# Altium footprint library iMX6 Rex Development Baseboard V1I1_PCB.PcbLib: 77 footprints (part 1 of 5)
Each footprint in its own frame and in the unit in brackets; x right, y up, seen from the top. Pads: shape width x height; smd on the part's side, far side on the other; paste and mask are expansions set on the pad; w line width, h text height; cw(c..) or ccw(c..) is an arc to the next point about the centre after c.
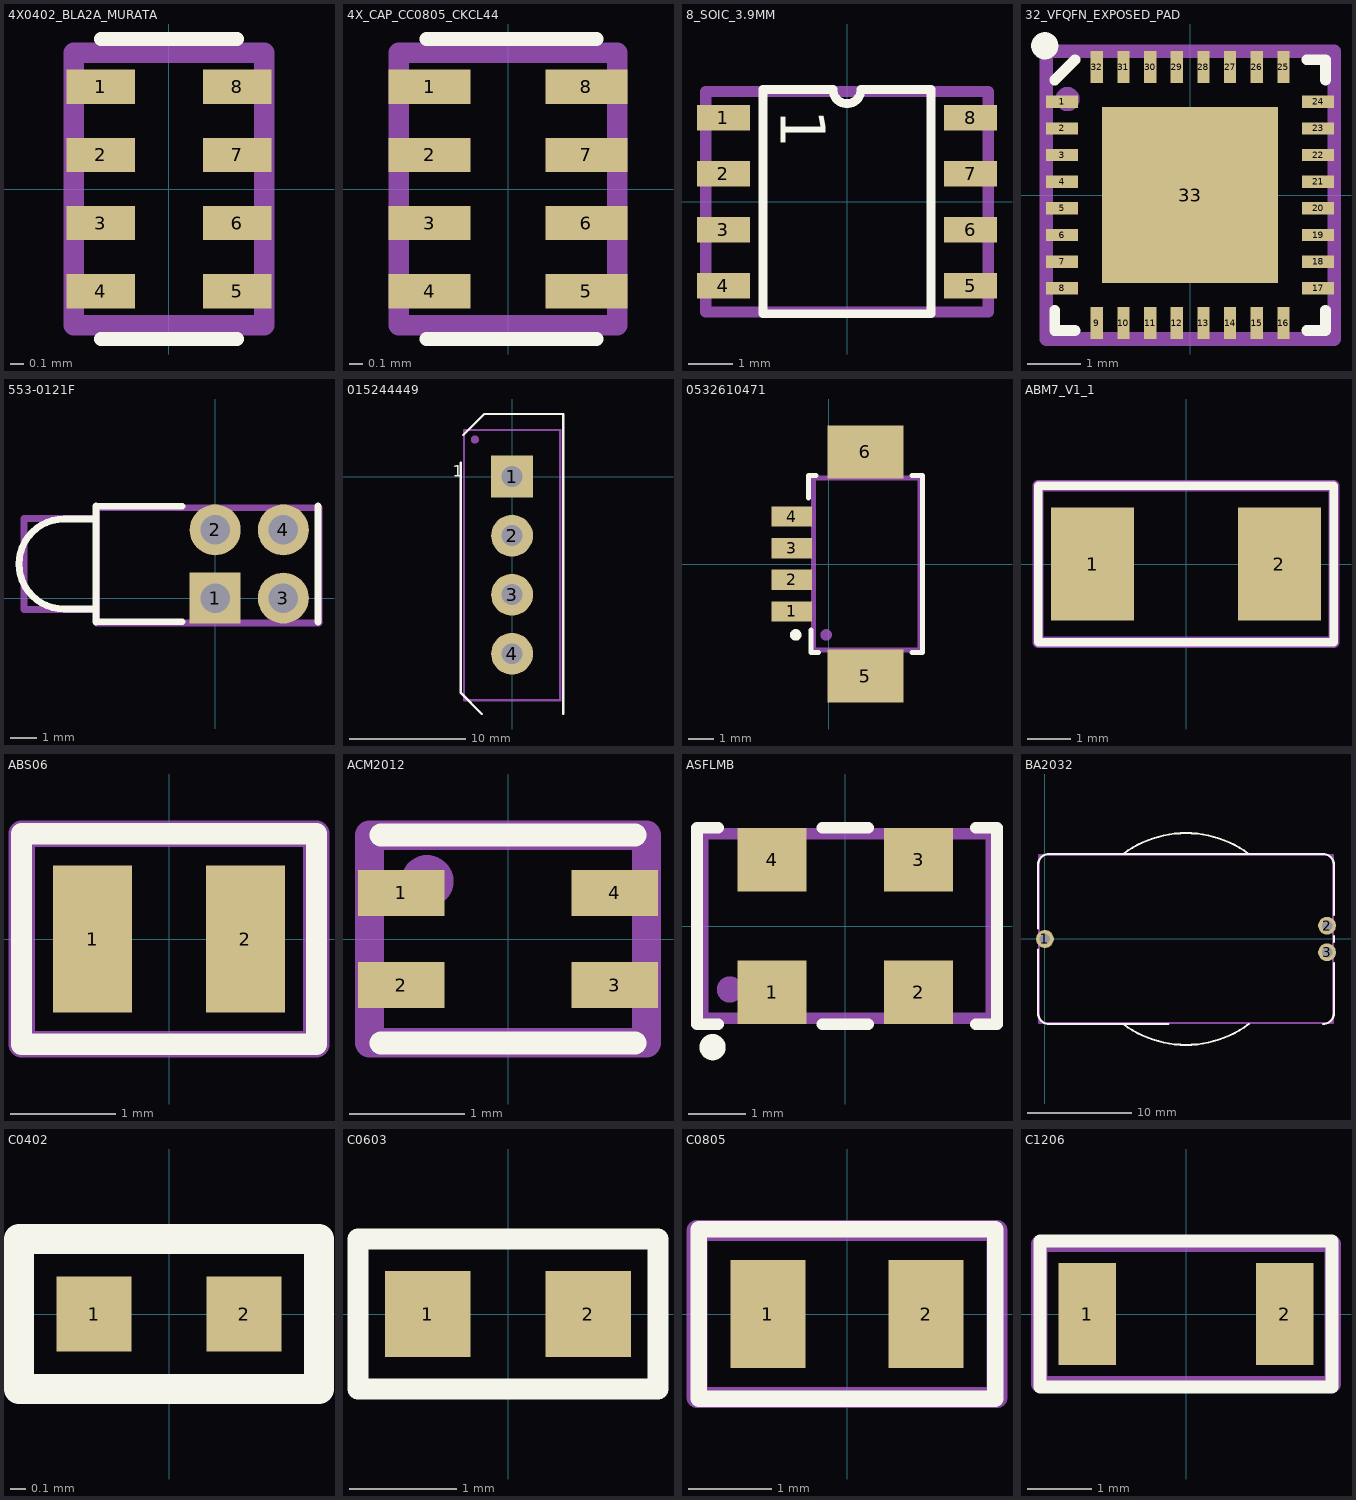
[diagram p0: the footprints below, top view; thin cyan lines are the x and y axes]

## 4X0402_BLA2A_MURATA [mm]
pads (8):
  rect 0.5x0.25 smd mask+0.025: 1(-0.5,0.75) 2(-0.5,0.25) 3(-0.5,-0.25) 4(-0.5,-0.75) 5(0.5,-0.75) 6(0.5,-0.25) 7(0.5,0.25) 8(0.5,0.75)
Top Overlay:
  lines w0.1: -0.5,-1.1 0.5,-1.1 ; -0.5,1.1 0.5,1.1
Mechanical 16:
  lines w0.15: -0.7,-1 0.7,-1 0.7,1 -0.7,1 -0.7,-1
Mechanical 29:
  text ".Designator" at 0.2,-0.7 h0.4
3D body: height 0.5, standoff 0, extent -0.5,-1 0.5,1

## 4X_CAP_CC0805_CKCL44 [mm]
pads (8):
  rect 0.6x0.25 smd mask+0.025: 1(-0.575,0.75) 2(-0.575,0.25) 3(-0.575,-0.25) 4(-0.575,-0.75) 5(0.575,-0.75) 6(0.575,-0.25) 7(0.575,0.25) 8(0.575,0.75)
Top Overlay:
  lines w0.1: -0.6,-1.1 0.65,-1.1 ; -0.6,1.1 0.65,1.1
Mechanical 16:
  lines w0.15: -0.8,-1 -0.8,1 0.8,1 0.8,-1 -0.8,-1
Mechanical 29:
  text ".Designator" at -0.2,0.7 h0.4
3D body: height 1, standoff 0, extent -0.7,-1 0.7,1

## 8_SOIC_3.9MM [mm]
pads (8):
  rect 1.2x0.58 smd: 1(-2.8,1.905) 2(-2.8,0.635) 3(-2.8,-0.635) 4(-2.8,-1.905) 5(2.8,-1.905) 6(2.8,-0.635) 7(2.8,0.635) 8(2.8,1.905)
Top Overlay:
  lines w0.2: -1.905,-2.54 1.905,-2.54 1.905,2.54 0.318,2.54 cw(c0,2.54) -0.318,2.54 -1.905,2.54 -1.905,-2.54
  text "1" at -1.5,2.1 h1.02
Mechanical 16:
  circle w0.254: c-2.7,1.9 r0.1
  lines w0.254: -3.2,-2.5 -3.2,2.5 3.2,2.5 3.2,-2.5 -3.2,-2.5
Mechanical 29:
  text ".Designator" at 1.1,0.6 h1.52
3D body "SOIC-8-1.step": height 1.75, standoff 0, extent -3,-2.45 3,2.45

## 32_VFQFN_EXPOSED_PAD [mm]
pads (33):
  rect 0.6x0.23 smd mask+0.051: 1(-2.4,1.75) 2(-2.4,1.25) 3(-2.4,0.75) 4(-2.4,0.25) 5(-2.4,-0.25) 6(-2.4,-0.75) 7(-2.4,-1.25) 8(-2.4,-1.75) 17(2.4,-1.75) 18(2.4,-1.25) 19(2.4,-0.75) 20(2.4,-0.25) 21(2.4,0.25) 22(2.4,0.75) 23(2.4,1.25) 24(2.4,1.75)
  rect 0.23x0.6 smd mask+0.051: 9(-1.75,-2.4) 10(-1.25,-2.4) 11(-0.75,-2.4) 12(-0.25,-2.4) 13(0.25,-2.4) 14(0.75,-2.4) 15(1.25,-2.4) 16(1.75,-2.4) 25(1.75,2.4) 26(1.25,2.4) 27(0.75,2.4) 28(0.25,2.4) 29(-0.25,2.4) 30(-0.75,2.4) 31(-1.25,2.4) 32(-1.75,2.4)
  rect 3.3x3.3 smd paste-10 mask+0.051: 33(0,0)
Top Overlay:
  circle w0.254: c-2.727,2.8 r0.127
  lines w0.2: -2.54,-2.54 -2.54,-2.159 ; -2.54,2.159 -2.159,2.54 ; -2.508,-2.54 -2.159,-2.54 ; 2.191,-2.54 2.54,-2.54 2.54,-2.159 ; 2.191,2.54 2.54,2.54 2.54,2.159
Top Paste:
  rectangle: -1.5,0.1 -0.1,1.5
  rectangle: 0.1,0.1 1.5,1.5
  rectangle: -1.5,-1.5 -0.1,-0.1
  rectangle: 0.1,-1.5 1.5,-0.1
Mechanical 16:
  circle w0.254: c-2.3,1.8 r0.1
  lines w0.254: -2.7,-2.7 -2.7,2.7 2.7,2.7 2.7,-2.7 -2.7,-2.7
Mechanical 29:
  text ".Designator" at 2,0.7 h1.52
3D body: height 0.9, standoff 0, extent -2.54,-2.54 2.54,2.54

## 553-0121F [mm]
pads (4):
  rect 1.9x1.9 hole 1.1: 1(0,0)
  round 1.9 hole 1.1: 2(0,2.54) 3(2.54,0) 4(2.54,2.54)
Top Overlay:
  lines w0.254: -4.445,-0.889 -4.445,3.429 ; -4.445,-0.406 -5.639,-0.406 cw(c-5.639,1.27) -5.639,2.946 -4.445,2.946 ; -4.43,-0.88 -1.23,-0.88 ; -4.43,3.42 -1.23,3.42 ; 3.833,-0.889 3.833,3.429
Mechanical 16:
  lines w0.254: -4.43,-0.43 -7.13,-0.43 -7.13,2.97 -4.43,2.97 ; -4.43,-0.93 -4.43,3.37 3.87,3.37 3.87,-0.93 -4.43,-0.93
Mechanical 29:
  text ".Designator" at -2.5,0.5 h1.52
3D body "55307XXF.stp": height 9.65, standoff -3.68, extent -7.28,-0.898 3.718,3.42

## 015244449 [mm]
pads (4):
  rect 3.6x3.6 hole 1.8: 1(0,0)
  round 3.6 hole 1.8: 2(0,-5.08) 3(0,-10.16) 4(0,-15.24)
Top Overlay:
  lines w0.2: -4.4,1.2 -4.4,-18.62 -2.6,-20.42 ; -4.2,3.58 -2.4,5.38 4.4,5.38 4.4,-20.42
  text "1" at -5.1,0 h1.02
Mechanical 16:
  circle w0.5: c-3.2,3.18 r0.1
  lines w0.2: -4.14,-19.25 4.14,-19.25 4.14,4.01 -4.14,4.01 -4.14,-19.25
Mechanical 29:
  text ".Designator" at 0.5,-10.02 h1.52
3D body "015244449.stp": height 10.16, standoff -3.6, extent -4.13,-19.25 4.15,4.01

## 0532610471 [mm]
pads (6):
  rect 1.6x0.8 smd: 1(-1.45,-1.875) 2(-1.45,-0.625) 3(-1.45,0.625) 4(-1.45,1.875)
  rect 3x2.1 smd: 5(1.45,-4.425) 6(1.45,4.425)
Top Overlay:
  circle w0.254: c-1.3,-2.8 r0.1
  lines w0.2: -0.8,2.6 -0.8,3.5 -0.5,3.5 ; -0.7,-2.6 -0.7,-3.5 -0.4,-3.5 ; 3.3,-3.5 3.7,-3.5 3.7,3.5 3.3,3.5
Mechanical 16:
  circle w0.254: c-0.1,-2.8 r0.1
  lines w0.2: -0.6,-3.4 -0.6,3.4 3.6,3.4 3.6,-3.4 -0.6,-3.4
Mechanical 29:
  text ".Designator" at 2.1,-2 h1.52
3D body "532610471.stp": height 3.39, standoff -0.01, extent -1.6,-5.075 3.6,5.075

## ABM7_V1_1 [mm]
pads (2):
  rect 1.9x2.6 smd: 1(-2.15,0) 2(2.15,0)
Top Overlay:
  lines w0.2: -3.4,-1.8 3.4,-1.8 3.4,1.8 -3.4,1.8 -3.4,-1.8
Mechanical 16:
  lines w0.254: -3.4,-1.8 3.4,-1.8 3.4,1.8 -3.4,1.8 -3.4,-1.8
Mechanical 29:
  text ".Designator" at 0.9,0.6 h1.52
3D body: height 1.45, standoff 1.4, extent -2,-1.3 2,1.5
3D body "Xtal-ABM7.STEP": height 1.44, standoff 0.04, extent -3.1,-1.85 3.1,1.85

## ABS06 [mm]
pads (2):
  rect 0.75x1.4 smd: 1(-0.725,0) 2(0.725,0)
Top Overlay:
  lines w0.2: -1.4,-1 1.4,-1 1.4,1 -1.4,1 -1.4,0 -1.4,-1
Mechanical 16:
  lines w0.254: -1.4,-1 -1.4,1 1.4,1 1.4,-1 -1.4,-1
Mechanical 29:
  text ".Designator" at -0.5,-0.3 h0.6
3D body: height 0.61, standoff 0.5, extent -0.825,-0.36 0.825,0.34
3D body "ABS06.STEP": height 0.6, standoff 0, extent -1,-0.62 1,0.6

## ACM2012 [mm]
pads (4):
  rect 0.75x0.4 smd mask+0.076: 1(-0.925,0.4) 2(-0.925,-0.4) 3(0.925,-0.4) 4(0.925,0.4)
Top Overlay:
  lines w0.2: -1.1,-0.9 1.1,-0.9 ; -1.1,0.9 1.1,0.9
Mechanical 16:
  circle w0.254: c-0.7,0.5 r0.1
  lines w0.254: -1.2,-0.9 1.2,-0.9 1.2,0.9 -1.2,0.9 -1.2,-0.9
Mechanical 29:
  text ".Designator" at 0.3,0.1 h0.4
3D body: height 1.3, standoff 0, extent -1.2,-0.7 1.2,0.7

## ASFLMB [mm]
pads (4):
  rect 1.2x1.1 smd: 1(-1.27,-1.15) 2(1.27,-1.15) 3(1.27,1.15) 4(-1.27,1.15)
Top Overlay:
  circle w0.254: c-2.3,-2.1 r0.1
  lines w0.2: -2.2,-1.7 -2.57,-1.7 -2.57,1.7 -2.2,1.7 ; -0.4,-1.7 0.4,-1.7 ; -0.4,1.7 0.4,1.7 ; 2.26,-1.7 2.63,-1.7 2.63,1.7 2.26,1.7
Mechanical 16:
  circle w0.254: c-2,-1.1 r0.1
  lines w0.2: -2.47,-1.6 2.53,-1.6 2.53,1.6 -2.47,1.6 -2.47,-1.6
Mechanical 29:
  text ".Designator" at 0.3,-0.5 h0.8
3D body: height 0.9, standoff 0, extent -2.47,-1.6 2.53,1.6

## BA2032 [mm]
pads (3):
  round 1.7 hole 1: 1(0,0) 2(26.9,1.27) 3(26.9,-1.27)
Top Overlay:
  lines w0.2: -0.65,-1 -0.65,-7.1 ccw(c0.375,-7.075) 0.4,-8.1 11.8,-8.1 ; -0.65,1 -0.65,7.1 cw(c0.375,7.075) 0.4,8.1 26.5,8.1 cw(c26.525,7.075) 27.55,7.1 27.55,2.3 ; 7.45,-8.1 ccw(c13.45,-0.1) 19.45,-8.1 ; 7.45,8.1 cw(c13.45,0.1) 19.45,8.1 ; 26.5,-8.1 ccw(c26.525,-7.075) 27.55,-7.1 27.55,-2.3 ; 27.55,-0.3 27.55,0.3
Mechanical 16:
  lines w0.2: -0.55,-8 -0.55,8 27.45,8 27.45,-8 -0.55,-8
Mechanical 29:
  text ".Designator" at 13,2.1 h1.52
3D body "BU2032-1-HD-G.STEP": height 5.25, standoff -3.8, extent -0.85,-10 27.75,10

## C0402 [mm]
pads (2):
  rect 0.5x0.5 smd: 1(-0.5,0) 2(0.5,0)
Top Overlay:
  lines w0.2: -1,-0.5 1,-0.5 1,0.5 -1,0.5 -1,-0.5
Mechanical 16:
  lines w0.15: -1,-0.5 1,-0.5 1,0.5 -1,0.5 -1,-0.5
Mechanical 29:
  text ".Designator" at 0.7,0.2 h0.4
3D body "CAPC1005X56N EIA 0402.step": height 0.56, standoff 0, extent -0.5,-0.25 0.5,0.25

## C0603 [mm]
pads (2):
  rect 0.8x0.8 smd: 1(-0.75,0) 2(0.75,0)
Top Overlay:
  lines w0.2: -1.4,-0.7 1.4,-0.7 1.4,0.7 -1.4,0.7 -1.4,-0.7
Mechanical 16:
  lines w0.15: -1.4,-0.7 -1.4,0.7 1.4,0.7 1.4,-0.7 -1.4,-0.7
Mechanical 29:
  text ".Designator" at -1.1,-0.3 h0.6
3D body "C0603.step": height 0.95, standoff 0.15, extent -0.8,-0.425 0.8,0.435
3D body "C0603.step": height 0.79, standoff 0, extent -0.8,-0.425 0.8,0.435

## C0805 [mm]
pads (2):
  rect 0.9x1.3 smd: 1(-0.95,0) 2(0.95,0)
Top Overlay:
  lines w0.2: -1.778,-1.016 1.778,-1.016 1.778,1.016 -1.778,1.016 -1.778,-1.016
Mechanical 16:
  lines w0.254: -1.8,-1 1.8,-1 1.8,1 -1.8,1 -1.8,-1
Mechanical 29:
  text ".Designator" at 0.7,0.3 h0.6
3D body "CAPC2012X95N EIA 0805.step": height 0.95, standoff 0, extent -1,-0.6 1,0.6
3D body "CAPC2012X95N EIA 0805.step": height 1.5, standoff 0.55, extent -1,-0.6 1,0.6

## C1206 [mm]
pads (2):
  rect 0.9x1.6 smd: 1(-1.55,0) 2(1.55,0)
Top Overlay:
  lines w0.2: -2.286,-1.143 2.286,-1.143 2.286,1.143 -2.286,1.143 -2.286,-1.143
Mechanical 16:
  lines w0.254: -2.3,-1.1 -2.3,1.1 2.3,1.1 2.3,-1.1 -2.3,-1.1
Mechanical 29:
  text ".Designator" at 1.8,0.5 h1
3D body "CAPC3216X95N EIA 1206.step": height 1.8, standoff 0.85, extent -1.6,-0.8 1.6,0.8
3D body "CAPC3216X95N EIA 1206.step": height 0.95, standoff 0, extent -1.6,-0.8 1.6,0.8